# Altium footprint library Diodes.PcbLib: 16 footprints
Each footprint in its own frame and in the unit in brackets; x right, y up, seen from the top. Pads: shape width x height; smd on the part's side, far side on the other; paste and mask are expansions set on the pad; w line width, h text height; cw(c..) or ccw(c..) is an arc to the next point about the centre after c.
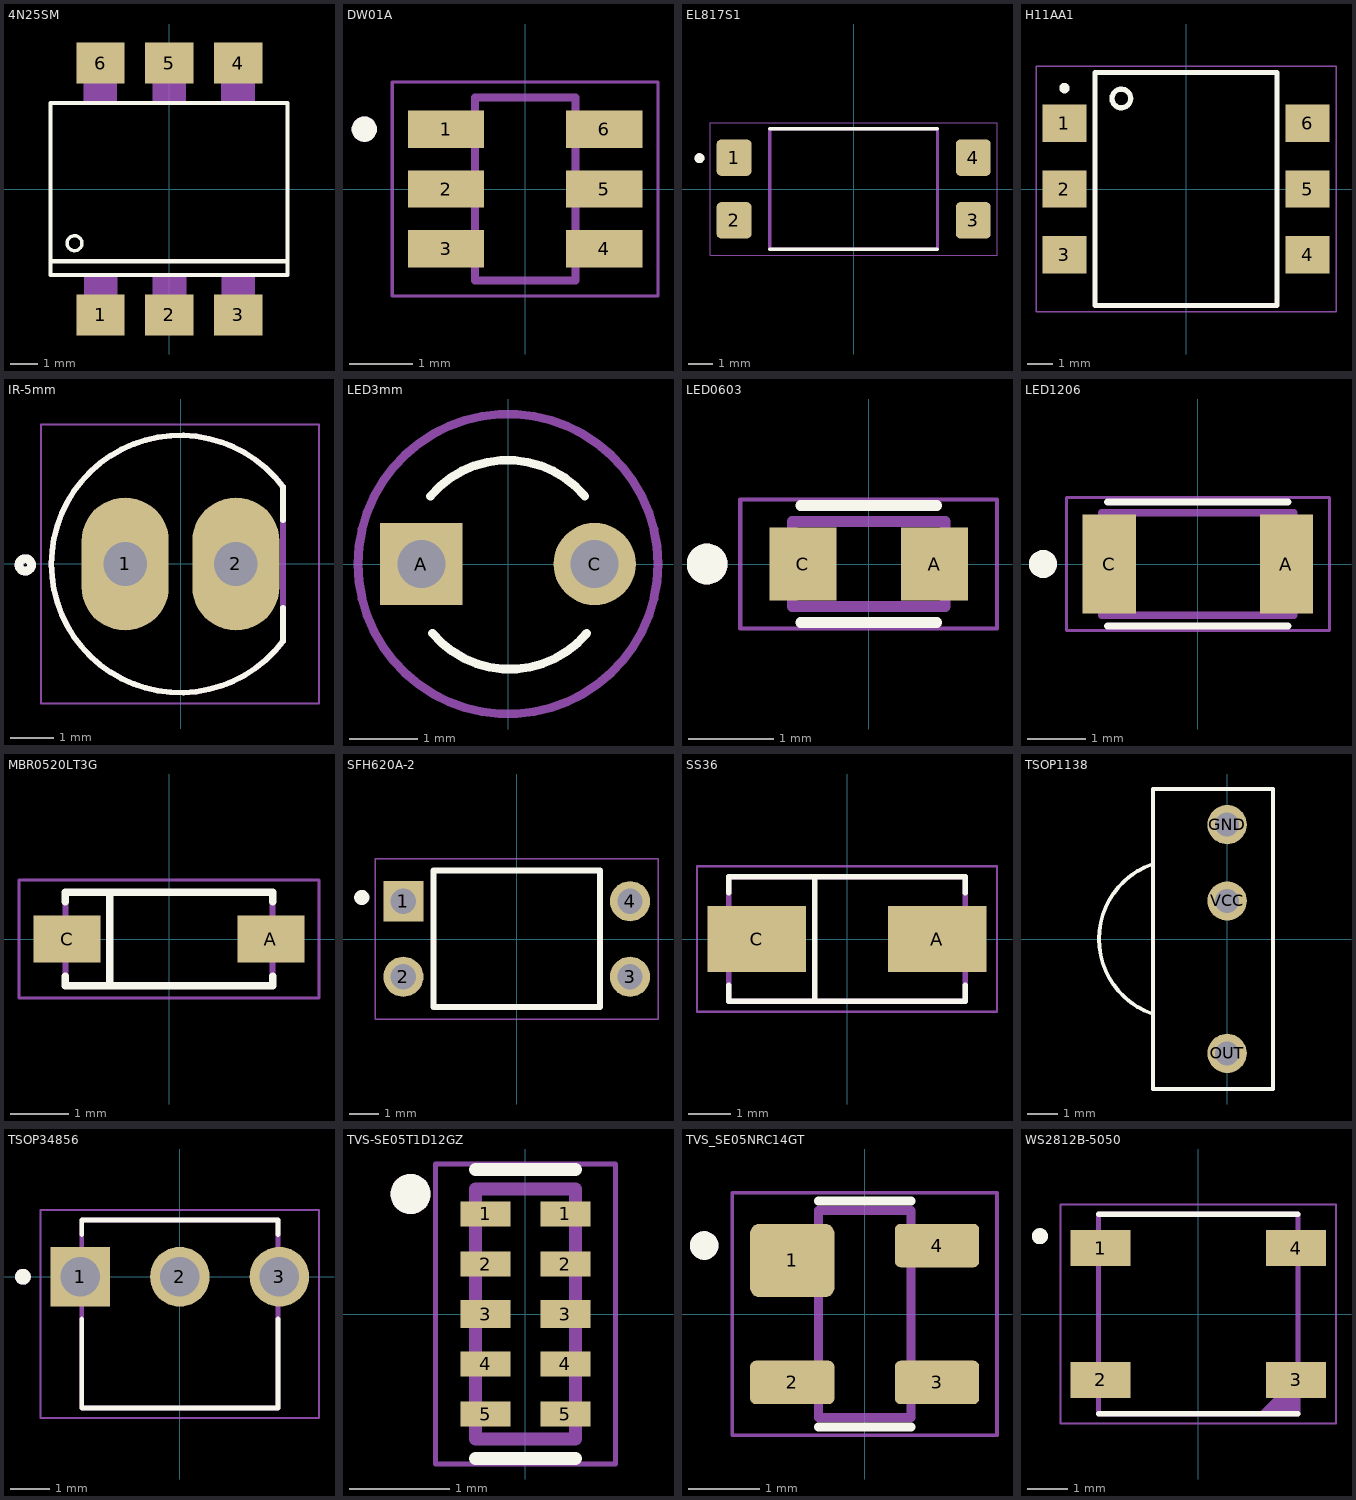
[diagram p0: the footprints below, top view; thin cyan lines are the x and y axes]

## 4N25SM [mm] "4N25SM"
pads (6):
  rect 1.78x1.52 smd: 1(-2.54,-4.645) 2(0,-4.645) 3(2.54,-4.645) 4(2.54,4.645) 5(0,4.645) 6(-2.54,4.645)
Top Overlay:
  circle w0.127: c-3.5,-2 r0.276
  lines w0.152: -4.285,-2.664 4.36,-2.664 ; 4.36,-2.664 4.36,3.18 -4.385,3.18 -4.385,-3.18 4.36,-3.18 4.36,-2.664
Mechanical 13:
  region: -1.92,-4.951 -3.146,-4.951 -3.146,-3.2 -1.92,-3.2
  region: 0.62,-4.953 -0.605,-4.953 -0.605,-3.2 0.62,-3.2
  region: 3.16,-4.959 1.939,-4.959 1.939,-3.2 3.16,-3.2
  region: 3.145,3.202 1.921,3.202 1.921,4.95 3.145,4.95
  region: 0.605,3.203 -0.621,3.203 -0.621,4.95 0.605,4.95
  region: -1.935,3.203 -3.163,3.203 -3.163,4.95 -1.935,4.95
3D body "4N25SM.STEP": height 5.08, standoff 0, extent -4.255,-4.583 4.255,4.583

## DW01A [mm] "SOT95P280X145-6N"
height 1.45
pads (6):
  rect 1.21x0.59 smd: 1(-1.255,0.95) 2(-1.255,0) 3(-1.255,-0.95) 4(1.255,-0.95) 5(1.255,0) 6(1.255,0.95)
Top Overlay:
  circle w0.2: c-2.555,0.95 r0.1
Mechanical 13:
  circle w0.2: c-2.555,0.95 r0.1
  lines w0.127: -0.8,-1.45 0.8,-1.45 0.8,1.45 -0.8,1.45 -0.8,-1.45
Mechanical 15:
  lines w0.05: -2.11,-1.7 -2.11,1.7 2.11,1.7 2.11,-1.7 -2.11,-1.7
3D body "step_temp.STEP": height 1.45, standoff 0, extent -1.4,-1.45 1.4,1.45

## EL817S1 [mm] "SOIC254P1030X390-4N"
pads (4):
  rrect25% 1.41x1.47 smd: 1(-4.85,1.27) 2(-4.85,-1.27) 3(4.85,-1.27) 4(4.85,1.27)
Top Overlay:
  circle w0.2: c-6.25,1.25 r0.1
  lines w0.127: -3.4,-2.44 3.4,-2.44 ; -3.4,2.44 3.4,2.44
Mechanical 13:
  circle w0.2: c-6.25,1.25 r0.1
  lines w0.127: -3.4,-2.44 3.4,-2.44 3.4,2.44 -3.4,2.44 -3.4,-2.44
Mechanical 15:
  lines w0.05: -5.81,-2.69 -5.81,2.69 5.81,2.69 5.81,-2.69 -5.81,-2.69
3D body "step_temp.STEP": height 3.9, standoff 0, extent -5.15,-2.29 5.15,2.29

## H11AA1 [mm] "SOIC254P1030X460-6N"
pads (6):
  rect 1.7x1.45 smd: 1(-4.7,2.54) 2(-4.7,0) 3(-4.7,-2.54) 4(4.7,-2.54) 5(4.7,0) 6(4.7,2.54)
Top Overlay:
  circle w0.2: c-4.7,3.9 r0.1
  circle w0.2: c-2.5,3.5 r0.361
  lines w0.2: -3.525,-4.5 -3.525,4.5 3.525,4.5 3.525,-4.5 -3.525,-4.5
Mechanical 15:
  lines w0.05: -5.8,-4.75 -5.8,4.75 5.8,4.75 5.8,-4.75 -5.8,-4.75
3D body "step_temp.STEP": height 4.37, standoff 0.01, extent -5.15,-4.3 5.15,4.3

## IR-5mm [mm] "Photodiode-IR-5mm"
pads (2):
  oval 2x3.048 hole 1 mask+0: 1(-1.27,0) 2(1.27,0)
Top Overlay:
  circle w0.2: c-3.56,-0.02 r0.143
  lines w0.127: 2.346,-1.775 cw(c-0.01,0) 2.346,1.775 ; 2.35,-1.77 2.35,-1 ; 2.35,1 2.35,1.77
Top Solder:
  circle w1: c-1.27,0 r0.5
  circle w1: c1.27,0 r0.5
Bottom Solder:
  circle w1: c1.27,0 r0.5
  circle w1: c-1.27,0 r0.5
Mechanical 13:
  circle w0.2: c-3.56,-0.02 r0.143
  lines w0.127: 2.346,-1.775 cw(c-0.01,0) 2.346,1.775 ; 2.35,-1.77 2.35,1.77
Mechanical 15:
  lines w0.05: -3.2,-3.2 -3.2,3.2 3.175,3.2 3.175,-3.2 -3.2,-3.2
3D body "TSAL6200-AS21--3DModel-STEP-269445.STEP": height 9.7, standoff -24.6, extent -2.9,-2.897 2.5,2.897

## LED3mm [mm]
pads (2):
  rect 1.208x1.208 hole 0.7: A(-1.27,0)
  round 1.208 hole 0.7: C(1.27,0)
Top Overlay:
  lines w0.127: -1.137,0.996 cw(c-0.005,0.045) 1.128,0.996 ; -1.108,-1.016 ccw(c0.025,-0.065) 1.157,-1.016
Mechanical 15:
  circle w0.127: c0,0 r2.2
3D body "step_temp.STEP": height 6.71, standoff -16.74, extent -1.587,-1.902 1.905,1.902

## LED0603 [mil] "LEDC1608X65N"
pads (2):
  rect 31x34 smd: A(30.5,0) C(-30.5,0)
Top Overlay:
  circle w9.45: c-74.8,0 r4.72
  lines w5: -31.5,-27.17 31.5,-27.17 ; -31.5,27.17 31.5,27.17
Mechanical 13:
  circle w9.45: c-74.8,0 r4.72
  lines w5: -35.43,-19.68 -35.43,19.68 35.43,19.68 35.43,-19.68 -35.43,-19.68
Mechanical 15:
  lines w1.97: -59.45,-29.92 -59.45,29.92 59.45,29.92 59.45,-29.92 -59.45,-29.92
3D body "LED0603_RED.step": height 35.43, standoff 0, extent -33.46,-17.72 33.46,17.72

## LED1206 [mil] "LEDC3115X65N"
pads (2):
  rect 36x67 smd: A(60,0) C(-60,0)
Top Overlay:
  circle w9.45: c-104.8,0 r4.72
  lines w5: -61.02,-41.93 61.02,-41.93 ; -61.02,41.93 61.02,41.93
Mechanical 13:
  circle w9.45: c-104.8,0 r4.72
  lines w5: -64.96,-34.65 -64.96,34.65 64.96,34.65 64.96,-34.65 -64.96,-34.65
Mechanical 15:
  lines w1.97: -88.98,-44.88 -88.98,44.88 88.98,44.88 88.98,-44.88 -88.98,-44.88
3D body "LED1206_RED.STEP": height 43.31, standoff 0, extent -63.39,-31.5 63.39,31.5

## MBR0520LT3G [mm] "SOD3716X135N"
pads (2):
  rect 1.15x0.8 smd: A(1.75,0) C(-1.75,0)
Top Overlay:
  lines w0.127: -1.778,-0.635 -1.778,-0.8 1.778,-0.8 1.778,-0.635 ; -1.778,0.635 -1.778,0.8 1.778,0.8 1.778,0.635 ; -1.016,-0.762 -1.016,0.762
Mechanical 13:
  lines w0.1: -1.778,-0.8 -1.778,0.8 1.778,0.8 1.778,-0.8 -1.778,-0.8
Mechanical 15:
  lines w0.05: -2.575,-1.016 2.575,-1.016 2.575,1.016 -2.575,1.016 -2.575,-1.016
3D body "step_temp.STEP": height 1.35, standoff 0, extent -1.84,-0.8 1.84,0.8

## SFH620A-2 [mm] "PDIP-4"
pads (4):
  rect 1.35x1.35 hole 0.85: 1(-3.81,1.27)
  round 1.35 hole 0.85: 2(-3.81,-1.27) 3(3.81,-1.27) 4(3.81,1.27)
Top Overlay:
  circle w0.254: c-5.207,1.397 r0.127
  lines w0.2: -2.8,2.29 -2.8,-2.29 2.8,-2.29 2.8,2.29 ; -2.8,2.3 2.8,2.3
Mechanical 15:
  lines w0.05: -4.75,-2.7 4.75,-2.7 4.75,2.7 -4.75,2.7 -4.75,-2.7
3D body "pdip4_p2-54x7-62_l4-58_w6-5.stp": height 4.5, standoff -2.71, extent -3.935,-2.29 3.935,2.29

## SS36 [mm] "DO-214AC (SMA)"
height 2.7
pads (2):
  rect 2.33x1.56 smd: A(2.14,0) C(-2.14,0)
Top Overlay:
  lines w0.127: -2.8,-1.1 -2.8,-1.475 2.8,-1.475 2.8,-1.1 ; -2.8,1.1 -2.8,1.475 2.8,1.475 2.8,1.1 ; -0.762,-1.455 -0.762,1.462
Mechanical 13:
  lines w0.127: -2.8,-1.475 2.8,-1.475 2.8,1.475 -2.8,1.475 -2.8,-1.475
Mechanical 15:
  lines w0.05: -3.555,-1.725 -3.555,1.725 3.555,1.725 3.555,-1.725 -3.555,-1.725
3D body "step_temp.STEP": height 2.17, standoff 0, extent -2.536,-1.342 2.514,1.358

## TSOP1138 [mm] "TSOP1138"
pads (3):
  round 1.308 hole 0.8: GND(0,3.81) OUT(0,-3.81) VCC(0,1.27)
Top Overlay:
  lines w0.127: -2.495,-2.493 cw(c-1.637,0) -2.495,2.493 ; -2.473,-5 1.527,-5 1.527,5 -2.473,5 -2.473,2.5 -2.473,-2.5 -2.473,-5
3D body "TSOP17xx.stp": height 12.5, standoff -3.5, extent -4.209,-5 1.59,5

## TSOP34856 [mm]
height 10.55
pads (3):
  rect 1.518x1.518 hole 1.01: 1(-2.54,0)
  round 1.518 hole 1.01: 2(0,0) 3(2.54,0)
Top Overlay:
  circle w0.2: c-4,0 r0.1
  lines w0.127: -2.5,-1.08 -2.5,-3.35 2.5,-3.35 2.5,-1.08 ; -2.5,1.08 -2.5,1.45 2.5,1.45 2.5,1.08
Mechanical 13:
  circle w0.2: c-4,0 r0.1
  lines w0.127: -2.5,-3.35 2.5,-3.35 2.5,1.45 -2.5,1.45 -2.5,-3.35
Mechanical 15:
  lines w0.05: -3.55,-3.6 3.55,-3.6 3.55,1.7 -3.55,1.7 -3.55,-3.6
3D body "step_temp.STEP": height 10.55, standoff -20.45, extent -2.965,-3.4 2.965,1.4

## TVS-SE05T1D12GZ [mm] "DFN2510"
pads (10):
  rect 0.5x0.25 smd: 1(-0.4,1) 1(0.4,1) 2(-0.4,0.5) 2(0.4,0.5) 4(-0.4,-0.5) 4(0.4,-0.5) 5(-0.4,-1) 5(0.4,-1)
  rect 0.5x0.279 smd: 3(-0.4,0) 3(0.4,0)
Top Overlay:
  circle w0.2: c-1.15,1.2 r0.1
  lines w0.127: -0.5,-1.445 0.5,-1.445 ; -0.5,1.445 0.5,1.445
Mechanical 13:
  circle w0.2: c-1.15,1.2 r0.1
  lines w0.127: -0.5,-1.25 0.5,-1.25 0.5,1.25 -0.5,1.25 -0.5,-1.25
Mechanical 15:
  lines w0.05: -0.9,-1.5 0.9,-1.5 0.9,1.5 -0.9,1.5 -0.9,-1.5
3D body "ESD8104MUTAG--3DModel-STEP-1.STEP": height 0.55, standoff 0, extent -0.5,-1.25 0.5,1.25

## TVS_SE05NRC14GT [mm] "SOT-143"
height 1.1
pads (4):
  rrect25% 1.18x1.03 smd mask+0.05: 1(-1.015,0.75)
  rrect25% 1.18x0.61 smd mask+0.05: 2(-1.015,-0.96) 3(1.015,-0.96) 4(1.015,0.96)
Top Overlay:
  circle w0.2: c-2.25,0.96 r0.1
  lines w0.127: -0.65,-1.585 0.65,-1.585 ; -0.65,1.585 0.65,1.585
Mechanical 13:
  circle w0.2: c-2.25,0.96 r0.1
  lines w0.127: -0.65,-1.45 -0.65,1.45 0.65,1.45 0.65,-1.45 -0.65,-1.45
Mechanical 15:
  lines w0.05: -1.855,-1.7 -1.855,1.7 1.855,1.7 1.855,-1.7 -1.855,-1.7
3D body "SR05.TCT.STEP": height 1.22, standoff 0, extent -1.181,-1.46 1.181,1.46

## WS2812B-5050 [mm] "LED_WS2812B_5050"
pads (4):
  rect 1.5x0.9 smd: 1(-2.45,1.65) 2(-2.45,-1.65) 3(2.45,-1.65) 4(2.45,1.65)
Top Overlay:
  circle w0.2: c-3.97,1.95 r0.1
  lines w0.127: -2.5,-2.5 2.5,-2.5 ; -2.5,2.5 2.5,2.5
Mechanical 13:
  circle w0.2: c-3.97,1.95 r0.1
  region: 2.5,-2.5 1.5,-2.5 2.5,-1.5
  lines w0.127: -2.5,-2.5 -2.5,2.5 2.5,2.5 2.5,-2.5 -2.5,-2.5
Mechanical 15:
  lines w0.05: -3.45,-2.75 3.45,-2.75 3.45,2.75 -3.45,2.75 -3.45,-2.75
3D body "WS2812B-B--3DModel-STEP-56544.STEP": height 1.62, standoff 0, extent -2.7,-2.5 2.7,2.5